# Altium schematic symbol library DioneyaPWR.SchLib: 10 symbols
Pins are listed as number, name and electrical type; pins without a type are passive.

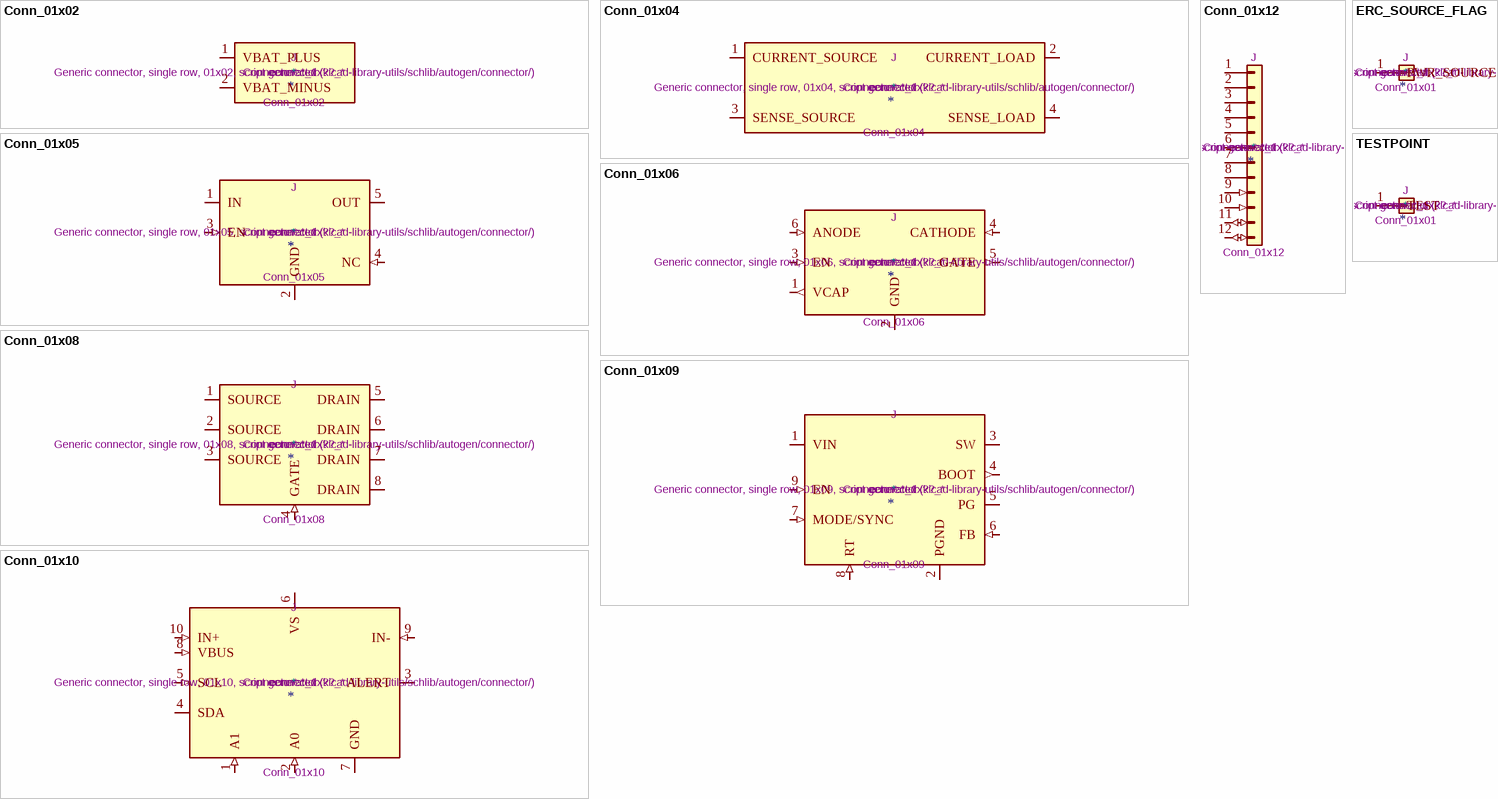
[diagram p0: symbols Conn_01x02 to TESTPOINT]

## Conn_01x02
designator *  value Conn_01x02  Reference: J  Datasheet: ~  ki_keywords: connector  ki_fp_filters: Connector*:*_1x??_*
Generic connector, single row, 01x02, script generated (kicad-library-utils/schlib/autogen/connector/); Description_: Generic connector, single row, 01x02, script generated (kicad-library-utils/schlib/autogen/connector/)
pins: 1 VBAT_PLUS, 2 VBAT_MINUS

## Conn_01x04
designator *  value Conn_01x04  Reference: J  Datasheet: ~  ki_keywords: connector  ki_fp_filters: Connector*:*_1x??_*
Generic connector, single row, 01x04, script generated (kicad-library-utils/schlib/autogen/connector/); Description_: Generic connector, single row, 01x04, script generated (kicad-library-utils/schlib/autogen/connector/)
pins: 1 CURRENT_SOURCE, 2 CURRENT_LOAD, 3 SENSE_SOURCE, 4 SENSE_LOAD

## Conn_01x05
designator *  value Conn_01x05  Reference: J  Datasheet: ~  ki_keywords: connector  ki_fp_filters: Connector*:*_1x??_*
Generic connector, single row, 01x05, script generated (kicad-library-utils/schlib/autogen/connector/); Description_: Generic connector, single row, 01x05, script generated (kicad-library-utils/schlib/autogen/connector/)
pins: 1 IN (power), 2 GND (power), 3 EN (in), 4 NC (in), 5 OUT (power)

## Conn_01x06
designator *  value Conn_01x06  Reference: J  Datasheet: ~  ki_keywords: connector  ki_fp_filters: Connector*:*_1x??_*
Generic connector, single row, 01x06, script generated (kicad-library-utils/schlib/autogen/connector/); Description_: Generic connector, single row, 01x06, script generated (kicad-library-utils/schlib/autogen/connector/)
pins: 1 VCAP (out), 2 GND (power), 3 EN (in), 4 CATHODE (in), 5 GATE (out), 6 ANODE (in)

## Conn_01x08
designator *  value Conn_01x08  Reference: J  Datasheet: ~  ki_keywords: connector  ki_fp_filters: Connector*:*_1x??_*
Generic connector, single row, 01x08, script generated (kicad-library-utils/schlib/autogen/connector/); Description_: Generic connector, single row, 01x08, script generated (kicad-library-utils/schlib/autogen/connector/)
pins: 1 SOURCE, 2 SOURCE, 3 SOURCE, 4 GATE (in), 5 DRAIN, 6 DRAIN, 7 DRAIN, 8 DRAIN

## Conn_01x09
designator *  value Conn_01x09  Reference: J  Datasheet: ~  ki_keywords: connector  ki_fp_filters: Connector*:*_1x??_*
Generic connector, single row, 01x09, script generated (kicad-library-utils/schlib/autogen/connector/); Description_: Generic connector, single row, 01x09, script generated (kicad-library-utils/schlib/autogen/connector/)
pins: 1 VIN (power), 2 PGND (power), 3 SW (power), 4 BOOT (out), 5 PG (oc), 6 FB (in), 7 MODE/SYNC (in), 8 RT (in), 9 EN (in)

## Conn_01x10
designator *  value Conn_01x10  Reference: J  Datasheet: ~  ki_keywords: connector  ki_fp_filters: Connector*:*_1x??_*
Generic connector, single row, 01x10, script generated (kicad-library-utils/schlib/autogen/connector/); Description_: Generic connector, single row, 01x10, script generated (kicad-library-utils/schlib/autogen/connector/)
pins: 1 A1 (in), 2 A0 (in), 3 ALERT (oc), 4 SDA (io), 5 SCL (in), 6 VS (power), 7 GND (power), 8 VBUS (in), 9 IN- (in), 10 IN+ (in)

## Conn_01x12
designator *  value Conn_01x12  Reference: J  Datasheet: ~  ki_keywords: connector  ki_fp_filters: Connector*:*_1x??_*
Generic connector, single row, 01x12, script generated (kicad-library-utils/schlib/autogen/connector/); Description_: Generic connector, single row, 01x12, script generated (kicad-library-utils/schlib/autogen/connector/)
pins: 1 3V8_MODEM, 2 GND_MODEM, 3 3V3_DIGITAL, 4 GND_DIGITAL, 5 1V8_MIC, 6 GND_MIC, 7 PWR_GOOD (oc), 8 FAULT (oc), 9 EN_MODEM (in), 10 EN_AUX (in), 11 I2C2_SCL (io), 12 I2C2_SDA (io)

## ERC_SOURCE_FLAG
designator *  value Conn_01x01  Reference: J  Datasheet: ~  ki_keywords: connector  ki_fp_filters: Connector*:*_1x??_*
Generic connector, single row, 01x01, script generated (kicad-library-utils/schlib/autogen/connector/); Description_: Generic connector, single row, 01x01, script generated (kicad-library-utils/schlib/autogen/connector/)
pins: 1 PWR_SOURCE (power)

## TESTPOINT
designator *  value Conn_01x01  Reference: J  Datasheet: ~  ki_keywords: connector  ki_fp_filters: Connector*:*_1x??_*
Generic connector, single row, 01x01, script generated (kicad-library-utils/schlib/autogen/connector/); Description_: Generic connector, single row, 01x01, script generated (kicad-library-utils/schlib/autogen/connector/)
pins: 1 TEST